# Altium schematic symbol library 2020-05-10_08-00-51.SchLib: 2 symbols
Pins are listed as number, name and electrical type; pins without a type are passive.

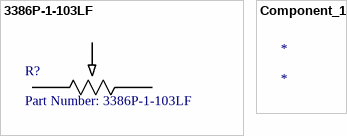
[diagram p0: symbols 3386P-1-103LF to Component_1]

## 3386P-1-103LF
designator R?, comment Part Number: 3386P-1-103LF
No Description Available; Vendor: Bourns Electronics; Built_By: EMA_UL_Team; SourceLibrary: Bourns_2012-08-08; Manufacturer_Part_Number: 3386P-1-103LF; Copyright: Copyright (C) 2018 Accelerated Designs. All rights reserved; RefDes: RefDes; Type: DEV; Value: Value
footprint POT_3386P
pins: 1, 2, 3

## Component_1
designator *